# Altium schematic symbol library 100uF SMD electrolyte.SchLib: 1 symbol
Pins are listed as number, name and electrical type; pins without a type are passive.

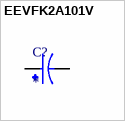
[diagram p0: symbol EEVFK2A101V]

## EEVFK2A101V
designator C?
100ÂµF 100V Aluminum Electrolytic Capacitors Radial, Can - SMD 5000 Hrs @ 105Â°C; MP: EEV-FK2A101V; MF: Panasonic; Value: *; Package: RADIAL-2 Panasonic; Availability: In Stock; SnapEDA_Link: https://www.snapeda.com/parts/EEV-FK2A101V/Panasonic/view-part/2356442/?ref=snap; Price: None; Purchase-URL: https://pricing.snapeda.com/search/part/EEV-FK2A101V/?ref=eda; Check_prices: https://www.snapeda.com/parts/EEV-FK2A101V/Panasonic/view-part/2356442/?ref=eda
footprint CAP_EEEFK1H101GL
pins: 1, 2